# Altium schematic symbol library 1241.1624.41.SchLib: 1 symbol
Pins are listed as number, name and electrical type; pins without a type are passive.

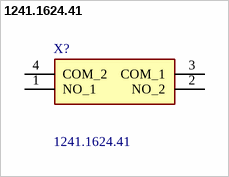
[diagram p0: symbol 1241.1624.41]

## 1241.1624.41
designator X?
Push button for PCB mounting; Manufacturer_Name: SCHURTER; Geometry.Height: 7.6mm; Manufacturer_Part_Number: 1241.1624.41; Mouser Part Number: *; Mouser Price/Stock: *; Arrow Part Number: *; Arrow Price/Stock: *; Datasheet Link: https://www.schurter.com/en/datasheet/PMS
footprint 1241162441
pins: 1 NO_1, 2 NO_2, 3 COM_1, 4 COM_2